# Altium footprint library SamacSys.PcbLib: 1008 footprints (part 28 of 63)
Each footprint in its own frame and in the unit in brackets; x right, y up, seen from the top. Pads: shape width x height; smd on the part's side, far side on the other; paste and mask are expansions set on the pad; w line width, h text height; cw(c..) or ccw(c..) is an arc to the next point about the centre after c.
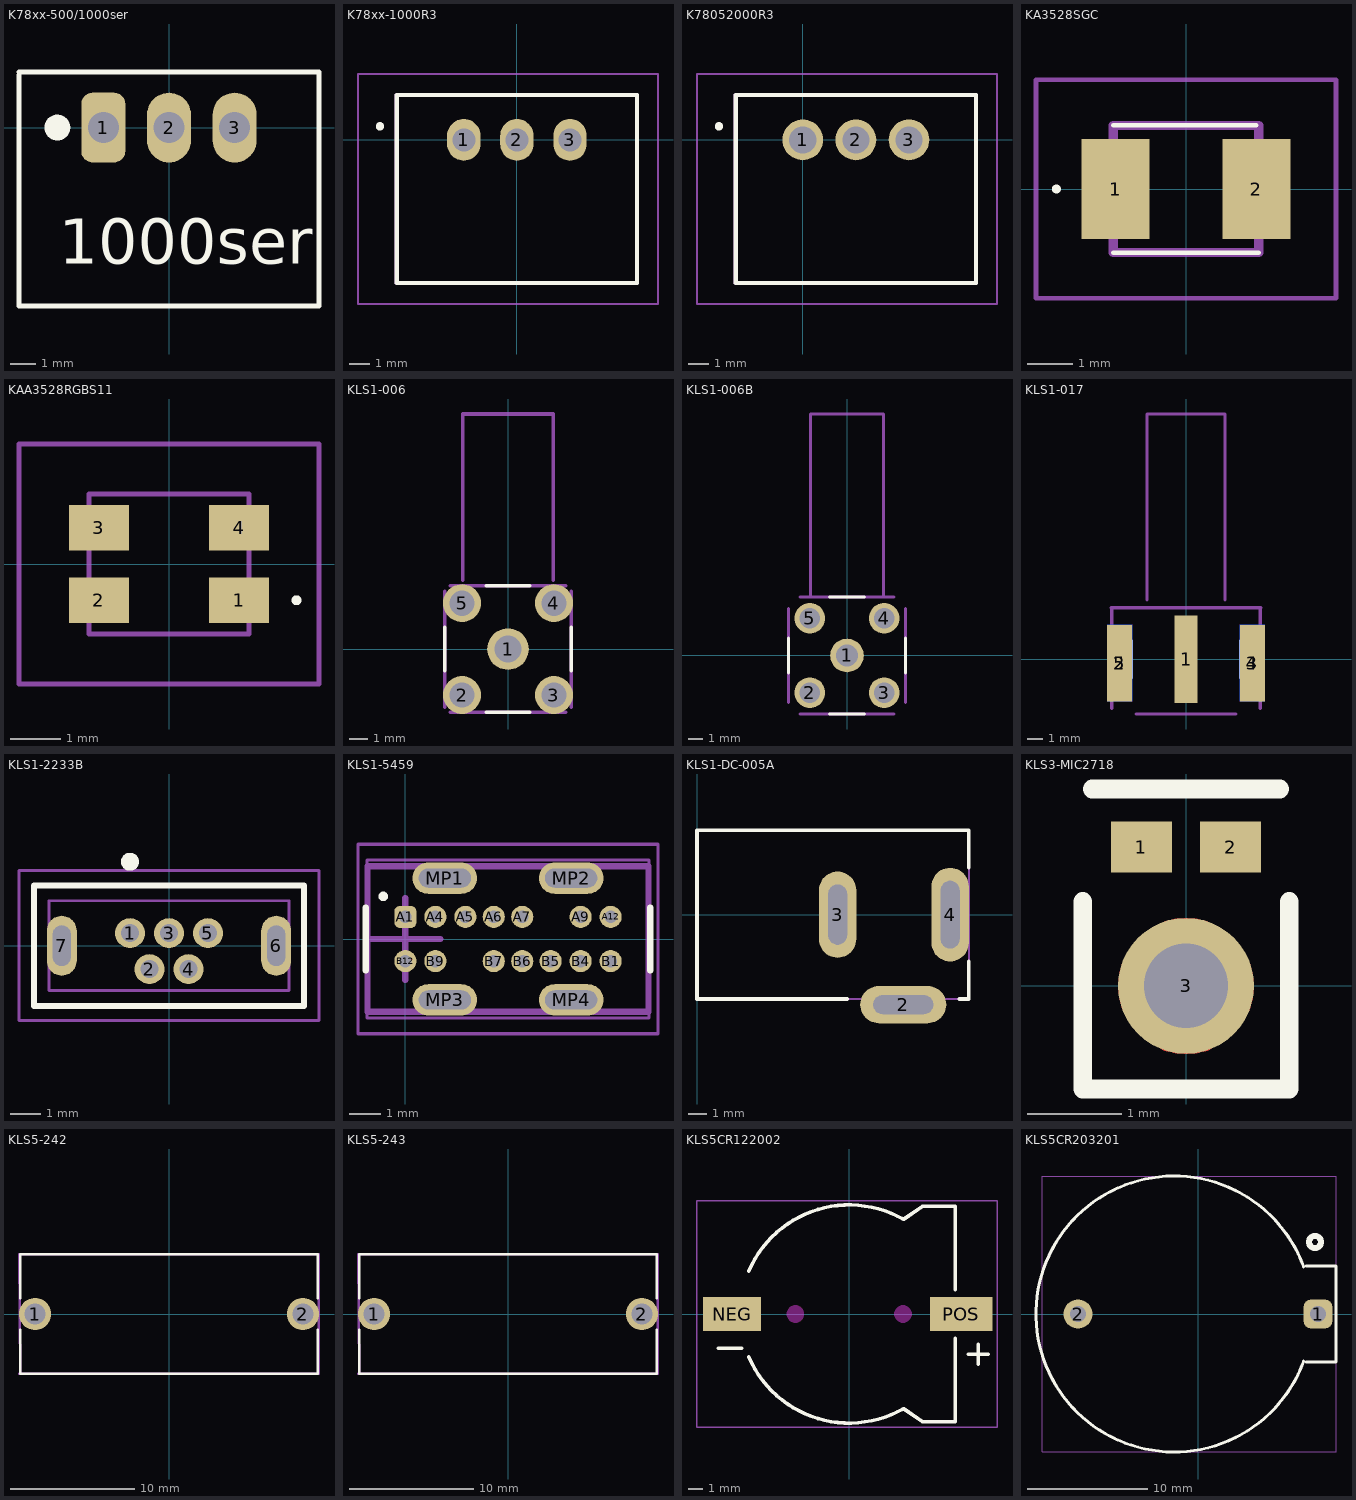
[diagram p27: the footprints below, top view; thin cyan lines are the x and y axes]

## K78xx-500/1000ser [mm]
height 6
pads (3):
  rrect50% 1.7x2.7 hole 1.2: 1(-2.54,0)
  oval 1.7x2.7 hole 1.2: 2(0,0) 3(2.54,0)
Top Overlay:
  circle w0.5: c-4.318,0 r0.25
  lines w0.2: -5.8,2.032 -5.8,-6.9 5.8,-6.9 5.8,2.15 -5.8,2.15
  text "1000ser" at -4.257,-5.842 h3
3D body "K78xx-1000R3.stp": height 17.5, standoff -4.1, extent -5.75,-6.9 5.75,2.1

## K78xx-1000R3 [mm]
height 6
pads (3):
  oval 1.6x2 hole 1.1: 1(-2.54,0) 2(0,0) 3(2.54,0)
Top Overlay:
  lines w0.2: -5.75,-6.85 -5.75,2.15 5.75,2.15 5.75,-6.85 -5.75,-6.85
  lines w0.3: -6.6,0.65 ccw(c-6.55,0.65) -6.5,0.65 ccw(c-6.55,0.65) -6.6,0.65
Assembly:
  lines w0.2: -5.75,-6.85 -5.75,2.15 5.75,2.15 5.75,-6.85 -5.75,-6.85
Countryard:
  lines w0.1: -7.6,-7.85 -7.6,3.15 6.75,3.15 6.75,-7.85 -7.6,-7.85
3D body "K7805-2000R3.stp": height 18.1, standoff -5, extent -5.75,-6.85 5.75,2.15

## K78052000R3 [mm]
pads (3):
  round 1.95 hole 1.3: 1(0,0) 2(2.54,0) 3(5.08,0)
Top Overlay:
  lines w0.2: -3.21,-6.85 -3.21,2.15 8.29,2.15 8.29,-6.85 -3.21,-6.85
  lines w0.3: -4.06,0.65 ccw(c-4.01,0.65) -3.96,0.65 ccw(c-4.01,0.65) -4.06,0.65
Assembly:
  lines w0.2: -3.21,-6.85 -3.21,2.15 8.29,2.15 8.29,-6.85 -3.21,-6.85
Countryard:
  lines w0.1: -5.06,-7.85 -5.06,3.15 9.29,3.15 9.29,-7.85 -5.06,-7.85
3D body "K7805-2000R3.stp": height 18.1, standoff -5, extent -3.21,-6.85 8.29,2.15

## KA3528SGC [mm]
pads (2):
  rect 1.5x2.2 smd: 1(-1.55,0) 2(1.55,0)
Top Overlay:
  lines w0.1: -2.9,0 ccw(c-2.85,0) -2.8,0 ccw(c-2.85,0) -2.9,0 ; -1.6,-1.4 1.6,-1.4 -1.6,-1.4 ; -1.6,1.4 1.55,1.4 -1.6,1.4
Assembly:
  lines w0.2: -1.6,-1.4 -1.6,1.4 1.6,1.4 1.6,-1.4 -1.6,-1.4
Countryard:
  lines w0.1: -3.3,-2.4 -3.3,2.4 3.3,2.4 3.3,-2.4 -3.3,-2.4
3D body "KA-3528SGC.stp": height 2.1, standoff 0, extent -1.75,-1.4 1.75,1.4

## KAA3528RGBS11 [mm]
pads (4):
  rect 1.2x0.9 smd: 1(1.4,-0.725) 2(-1.4,-0.725) 3(-1.4,0.725) 4(1.4,0.725)
Top Overlay:
  lines w0.1: 2.5,-0.725 ccw(c2.55,-0.725) 2.6,-0.725 ccw(c2.55,-0.725) 2.5,-0.725
Assembly:
  lines w0.1: -1.6,-1.4 -1.6,1.4 1.6,1.4 1.6,-1.4 -1.6,-1.4
Countryard:
  lines w0.1: -3,-2.4 -3,2.4 3,2.4 3,-2.4 -3,-2.4
3D body "KAA-3528RGBS-11.stp": height 2.2, standoff 0, extent -1.6,-1.4 1.6,1.4

## KLS1-006 [mm]
pads (5):
  round 2.3 hole 1.5: 1(0,0)
  round 2.1 hole 1.4: 2(-2.54,-2.54) 3(2.54,-2.54) 4(2.54,2.54) 5(-2.54,2.54)
Top Overlay:
  lines w0.2: -3.5,-1.2 -3.5,1.2 ; -1.2,-3.5 1.2,-3.5 ; -1.2,3.5 1.2,3.5 ; 3.5,-1.2 3.5,1.2
Assembly:
  lines w0.2: -3.5,-3.2 -3.5,3.2 ; -3.2,-3.5 3.2,-3.5 ; -3.2,3.5 3.2,3.5 ; -2.5,3.8 -2.5,13 2.5,13 2.5,3.8 ; 3.5,-3.2 3.5,3.2
3D body "MOLEX SD-73100-0114.stp": height 9.67, standoff -3.83, extent -3.175,-3.125 3.175,11.675

## KLS1-006B [mm]
pads (5):
  round 2.3 hole 1.5: 1(0,0)
  round 2.1 hole 1.4: 2(-2.54,-2.54) 3(2.54,-2.54) 4(2.54,2.54) 5(-2.54,2.54)
Top Overlay:
  lines w0.2: -4,-1.2 -4,1.2 ; -1.2,-4 1.2,-4 ; -1.2,4 1.2,4 ; 4,-1.2 4,1.2
Assembly:
  lines w0.2: -4,-3.2 -4,3.2 ; -3.2,-4 3.2,-4 ; -3.2,4 3.2,4 ; -2.5,4 -2.5,16.5 2.5,16.5 2.5,4 ; 4,-3.2 4,3.2
3D body "MOLEX SD-73100-0114.stp": height 9.67, standoff -3.83, extent -3.175,-3.125 3.175,11.675

## KLS1-017 [mm]
pads (5):
  rect 1.5x5.6 smd: 1(0,0)
  rect 1.6x4.9 smd: 2(-4.25,-0.25) 3(4.25,-0.25)
  rect 1.6x4.9 smd far side: 4(4.25,-0.25) 5(-4.25,-0.25)
Top Overlay:
  lines w0.2: -3.5,-1.2 -3.5,1.2 ; 3.5,-1.2 3.5,1.2
Top Assembly:
  lines w0.2: -4.8,3.3 4.8,3.3
  text "PCB Edge" at -2.225,3.819 h1.6
Assembly:
  lines w0.2: -4.75,-3.15 -4.75,3.25 ; -3.2,-3.5 3.2,-3.5 ; -2.5,3.8 -2.5,15.7 2.5,15.7 2.5,3.8 ; 4.75,-3.15 4.75,3.25
3D body "User Library-RP_SMA_PCB.step": height 4.36, standoff -3.56, extent -4.76,-1.75 4.76,15.7

## KLS1-2233B [mm] "Micro USB Vertical"
pads (7):
  round 1 hole 0.6: 1(-1.3,0.42) 2(-0.65,-0.78) 3(0,0.42) 4(0.65,-0.78) 5(1.3,0.42)
  oval 1x2 hole 0.6 slot 1.35 at 90 deg: 6(3.575,0) 7(-3.575,0)
Top Overlay:
  circle w0.3: c-1.3,2.8 r0.15
  lines w0.2: -4.5,-2 -4.5,2 4.5,2 4.5,-2 -4.5,-2
Assembly:
  lines w0.1: -4,-1.5 4,-1.5 4,1.5 -4,1.5 -4,-1.5
Countryard:
  lines w0.1: -5,-2.5 5,-2.5 5,2.5 -5,2.5 -5,-2.5
3D body "usb3130_30_a.stp": height 5.61, standoff -1.5, extent -3.971,-1.428 3.971,1.504

## KLS1-5459 [mm] "TypeC, Vertical"
pads (18):
  rrect50% 0.7x0.7 hole 0.4: A1(0,0.7)
  round 0.7 hole 0.4: A4(0.95,0.7) A5(1.9,0.7) A6(2.8,0.7) A7(3.7,0.7) A9(5.55,0.7) A12(6.5,0.7) B1(6.5,-0.7) B4(5.55,-0.7) B5(4.6,-0.7) B6(3.7,-0.7) B7(2.8,-0.7) B9(0.95,-0.7) B12(0,-0.7)
  oval 2.05x1 hole 0.6 slot 1.65 at 0 deg: MP1(1.25,1.93) MP2(5.25,1.93) MP3(1.25,-1.93) MP4(5.25,-1.93)
Top Overlay:
  lines w0.2: -1.25,-1 -1.25,1 ; 7.75,-1 7.75,1 ; -0.75,1.348 cw(c-0.7,1.348) -0.65,1.348 ; -0.75,1.348 ccw(c-0.7,1.348) -0.65,1.348 ; -0.75,1.348 ccw(c-0.7,1.348) -0.65,1.348
Top Assembly:
  lines w0.2: -1.1,0 1.1,0 ; 0,-1.3 0,1.3 ; -1.2,-2.3 7.7,-2.3 7.7,2.3 -1.2,2.3 -1.2,-2.3
Top Courtyard:
  lines w0.1: -1.5,-3 -1.5,3 8,3 8,-3 -1.5,-3
Assembly:
  lines w0.1: -1.22,-2.5 7.72,-2.5 7.72,2.5 -1.22,2.5 -1.22,-2.5
COMPONENT DIMENSIONS:
  text "fake 3D" at 0.857,2.594 h2
3D body "USB4070-30-C.stp": height 10.44, standoff -1.36, extent -1.186,-2.25 7.686,2.3

## KLS1-DC-005A [mm]
height 11
pads (3):
  oval 4.6x2 hole 1 slot 3.2 at 0 deg: 2(11,-4.8)
  oval 2x4.6 hole 1 slot 3.2 at 90 deg: 3(7.5,0)
  oval 2x5 hole 1 slot 3.6 at 90 deg: 4(13.5,0)
Top Overlay:
  lines w0.2: 8,-4.5 0,-4.5 0,4.5 14.5,4.5 14.5,2.5 ; 14,-4.5 14.5,-4.5 14.5,-2.5
Top Assembly:
  lines w0.1: 0,-4.5 0,4.5 14.5,4.5 14.5,-4.5 0,-4.5

## KLS3-MIC2718 [mm]
pads (3):
  rect 0.65x0.545 smd: 1(-0.475,1.48) 2(0.475,1.48)
  round 1.45 hole 0.9 unplated paste-2539.97: 3(0,0)
Top Layer:
  lines w0.25: -0.569,-0.19 cw(c0,0) -0.569,0.19 ; -0.189,-0.573 ccw(c0,-0.004) 0.19,-0.573 ; -0.19,0.569 cw(c0,0) 0.19,0.569 ; 0.568,-0.196 ccw(c-0.001,-0.006) 0.568,0.184
Top Overlay:
  lines w0.2: -1.1,0.9 -1.1,-1.1 1.1,-1.1 1.1,0.9 ; -1,2.1 1,2.1
  text "." at -1.024,2.426 h5

## KLS5-242 [mm] "Fuse Holder, 5.2*20mm"
height 11
pads (2):
  round 2.6 hole 1.7: 1(-10.795,0) 2(10.795,0)
Top Overlay:
  lines w0.2: -12,-1.27 -12,-4.8 12,-4.8 12,-1.27 ; -12,1.27 -12,4.8 12,4.8 12,1.27
Top Assembly:
  lines w0.2: -12.065,-4.8 12.065,-4.8 12.065,4.8 -12.065,4.8 -12,-4.8
3D body "User Library-Fuse_Holder_FH-101-1.STEP": height 4, standoff -11, extent -12.15,-4.8 12.15,4.8

## KLS5-243 [mm] "Fuse Holder, 5.2*20mm"
height 11
pads (2):
  round 2.6 hole 1.7: 1(-10.795,0) 2(10.795,0)
Top Overlay:
  lines w0.2: -12,-1.27 -12,-4.8 12,-4.8 12,-1.27 ; -12,1.27 -12,4.8 12,4.8 12,1.27
Top Assembly:
  lines w0.2: -12.065,-4.8 12.065,-4.8 12.065,4.8 -12.065,4.8 -12,-4.8
3D body "FH-102C.stp": height 15.5, standoff -5.09, extent -13.15,-4.75 13.15,4.75

## KLS5CR122002 [mm]
height 9
pads (2):
  rect 4.04x2.4 smd: NEG(-8.15,0)
  rect 4.36x2.4 smd: POS(7.82,0)
Top Overlay:
  lines w0.25: -9.1,-2.4 -7.5,-2.4 ; -6.986,-2.994 ccw(c0,0) 3.771,-6.599 ; -6.986,2.994 cw(c0,0) 3.771,6.599 ; 3.8,-6.6 5.1,-7.5 7.4,-7.5 7.4,-1.7 ; 3.8,6.6 5.1,7.5 7.4,7.5 7.4,1.7 ; 8.3,-2.8 9.7,-2.8 ; 9,-3.5 9,-2.1
Keep-Out Layer:
  board cut-out: 3.15,0 3.15,-0.119 3.241,-0.34 3.41,-0.509 3.631,-0.6 3.75,-0.6 3.869,-0.6 4.09,-0.509 4.259,-0.34 4.35,-0.119 4.35,0 4.35,0.119 4.259,0.34 4.09,0.509 3.869,0.6 3.75,0.6 3.631,0.6 3.41,0.509 3.241,0.34 3.15,0.119
  board cut-out: -3.15,0 -3.15,0.119 -3.241,0.34 -3.41,0.509 -3.631,0.6 -3.75,0.6 -3.869,0.6 -4.09,0.509 -4.259,0.34 -4.35,0.119 -4.35,0 -4.35,-0.119 -4.259,-0.34 -4.09,-0.509 -3.869,-0.6 -3.75,-0.6 -3.631,-0.6 -3.41,-0.509 -3.241,-0.34 -3.15,-0.119
Countryard:
  lines w0.1: -10.6,-7.9 10.3,-7.9 10.3,7.9 -10.6,7.9 -10.6,-7.9
3D body "BC501SM--3DModel-STEP-1.STEP": height 4, standoff -0.94, extent -8.5,-7.491 9.5,7.491

## KLS5CR203201 [mm]
height 9
pads (2):
  rrect50% 2.4x2.4 hole 1.3 unplated: 1(10,0)
  round 2.4 hole 1.3 unplated: 2(-10,0)
Top Overlay:
  lines w0.25: 8.808,-3.93 cw(c-2,0) 8.808,3.93 ; 9,-4 11.5,-4 11.5,4 9,4
  lines w0.5: 9.25,6 ccw(c9.75,6) 10.25,6 ccw(c9.75,6) 9.25,6
Countryard:
  lines w0.1: -13,-11.5 11.5,-11.5 11.5,11.5 -13,11.5 -13,-11.5
3D body "KLS5-CR2032-01 battery holder.stp": height 8.7, standoff -3.8, extent -13.038,-11.05 11.25,11.05